# Altium schematic symbol library TitansLib.SchLib: 462 symbols (part 23 of 24)
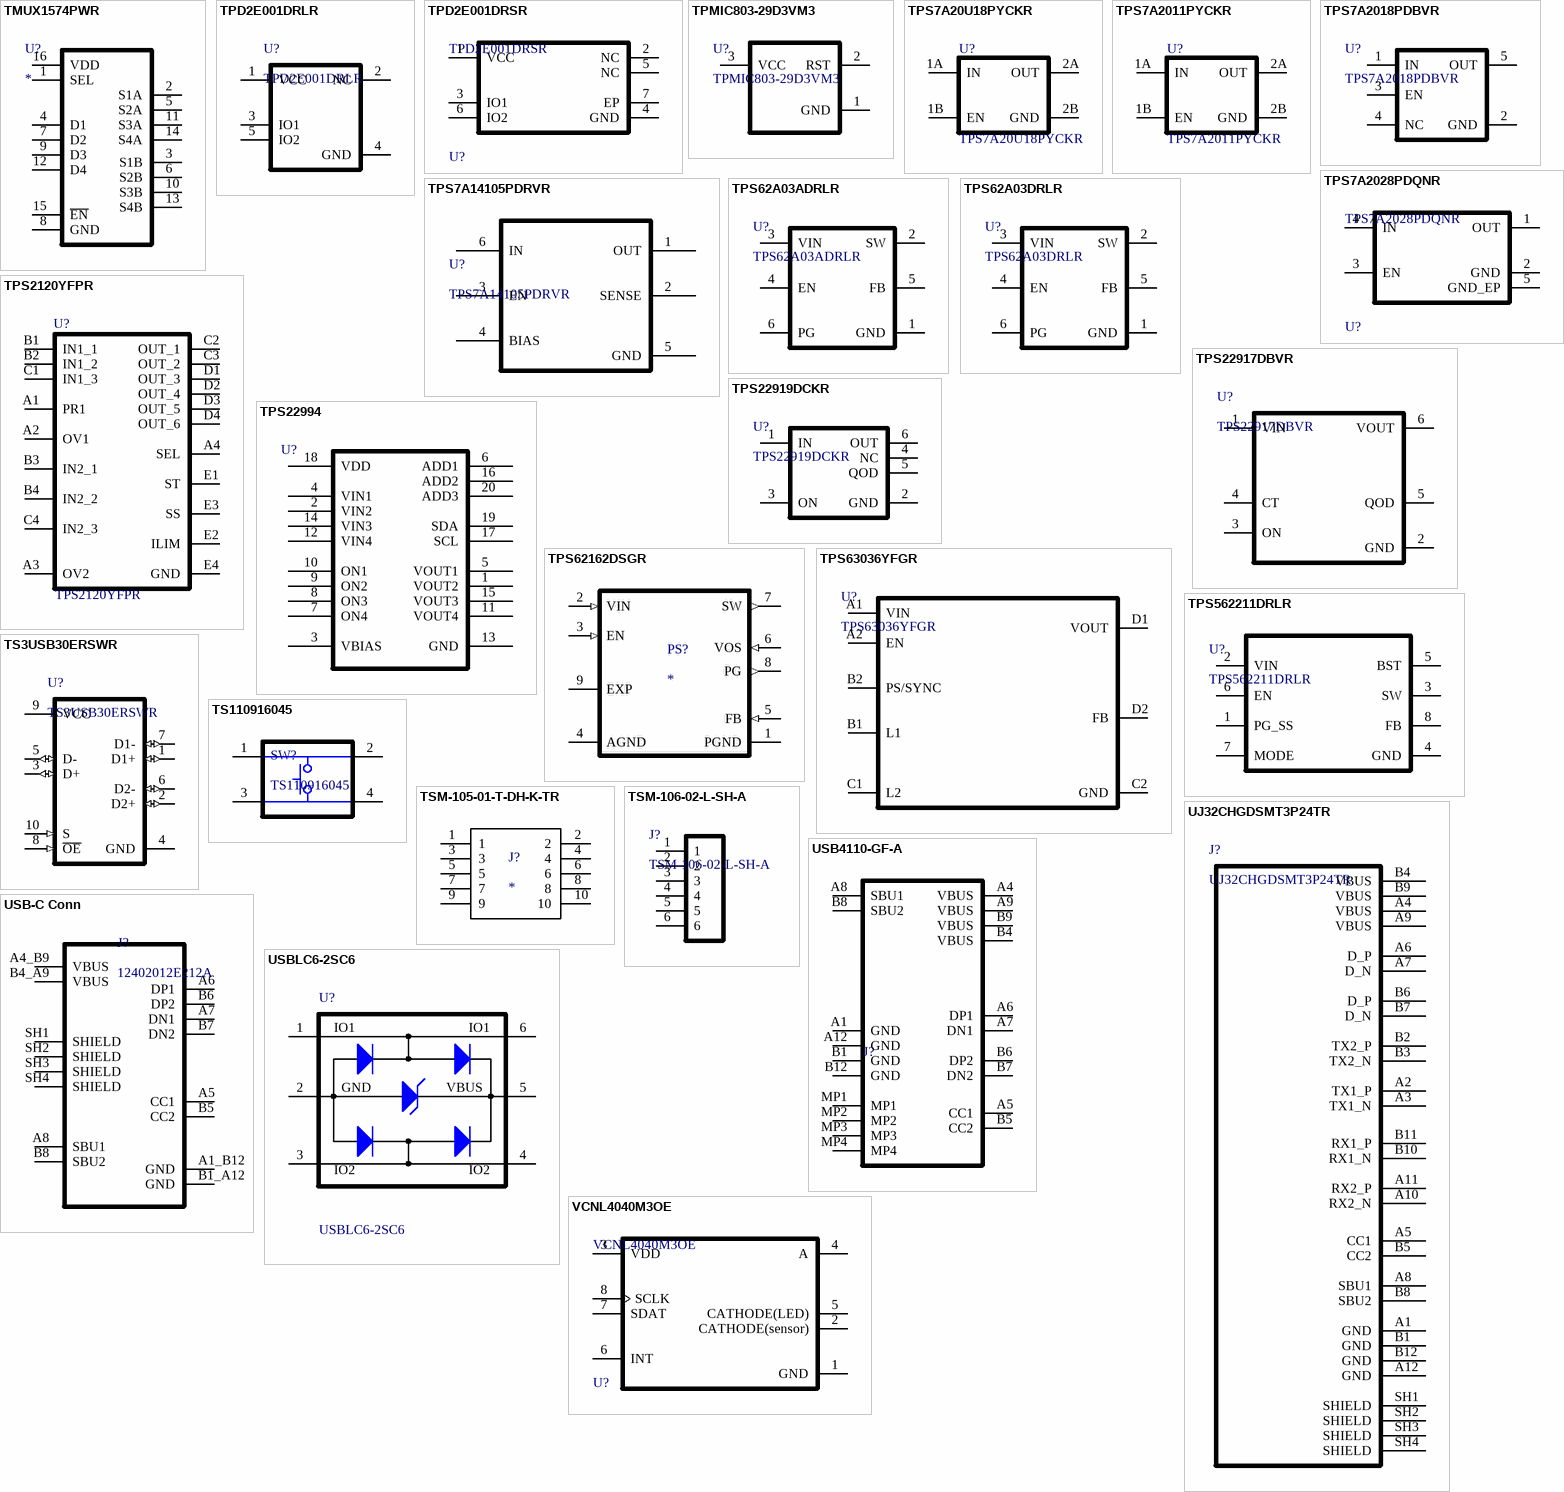
[diagram p39: symbols TMUX1574PWR to VCNL4040M3OE]

## TPD2E001DRSR
designator U?
ESD Suppressor Diode Diode Array Uni-Dir 5.5V 105.5Vc 6-Pin WSON EP T/R; Manufacturer: Texas Instruments; Manufacturer Lifecycle Status: ACTIVE; Breakdown Voltage: 11V; Value: 1.5pF; Clamping Voltage: 25V; Direction: Unidirectional; Element Configuration: Dual; ESD Protection: Yes; Interface: Ethernet, LVDS, USB; Leakage Current: 1nA; Max Junction Temperature (Tj): 150°C; Number of Bidirectional Channels: 2; Test Current: 10mA; Supplier: DigiKey; Supplier Part Number: 296-22850-1-ND; Manufacturer Part Number: TPD2E001DRSR; RoHS: Compliant; Category: ESD and Circuit Protection ICs; Stock: 3433; Pricing: 1=0.75, 10=0.467, 100=0.301, 500=0.229 (USD); Ambient Temperature Range High: 85°C; Contact Plating: Gold; Depth: 3mm; Height: 800µm; Lead Free: Lead Free; Length: 3mm; Lifecycle Status: Production; Max Operating Temperature: 85°C; Max Reverse Leakage Current: 1nA; Min Breakdown Voltage: 11V; Min Operating Temperature: -40°C; Number of Channels: 2; Pins: 6; Operating Supply Voltage: 5.5V; Power Line Protection: Yes; Radiation Hardening: No; REACH SVHC: No; Reverse Standoff Voltage: 5.5V; Schedule B: 8541100080, 8541100080|8541100080|8541100080|8541100080|8541100080; Termination: SMD/SMT; Thickness: 750µm; Width: 3mm; ComponentLink1URL: https://octopart.com:443/opatz8j6/c1?t=G5D4zGozD0BNT3cxhzco7bRIaplnG9lFZaUpRUbE2NnHXxcGA_XCuDnwQhwVF_yok-rTTqT5PFQJ2Qkyk_p6F5OTRnaO5Y9qrqx3r299atTUcFhIGxR9x8XXybA_BTREn7P9YEB8Sxr7wNNf2yrBTcf95Xy-yigiudGeCyD5aZnNwczcJGQhRY90tWEtwvpnsVF99hRq7bMKt9yDuX2oTKLq-so77TKlExe_fHujvGLMwbj1qb29dnxRtQJouMWSDPcMvgy3ROqxbdTBtnrLq__OX75Yskrbqh0KplupRJhJVZ3IAOagwOa-7U_XGct6gKDw8sFVN6jn41bU-fjHhapUVC4JdHJQvOJ4TuDNXVmlPDPTGtQSJ0L2ou7ekI1EwI0TJhY&src-supplier=Texas+Instruments; ComponentLink1Description: https://octopart.com:443/opatz8j6/c1?t=G5D4zGozD0BNT3cxhzco7bRIaplnG9lFZaUpRUbE2NnHXxcGA_XCuDnwQhwVF_yok-rTTqT5PFQJ2Qkyk_p6F5OTRnaO5Y9qrqx3r299atTUcFhIGxR9x8XXybA_BTREn7P9YEB8Sxr7wNNf2yrBTcf95Xy-yigiudGeCyD5aZnNwczcJGQhRY90tWEtwvpnsVF99hRq7bMKt9yDuX2oTKLq-so77TKlExe_fHujvGLMwbj1qb29dnxRtQJouMWSDPcMvgy3ROqxbdTBtnrLq__OX75Yskrbqh0KplupRJhJVZ3IAOagwOa-7U_XGct6gKDw8sFVN6jn41bU-fjHhapUVC4JdHJQvOJ4TuDNXVmlPDPTGtQSJ0L2ou7ekI1EwI0TJhY&src-supplier=Texas+Instruments; ComponentLink2URL: https://datasheet.octopart.com:443/TPD2E001DRSR-Texas-Instruments-datasheet-21096186.pdf?src-supplier=Texas+Instruments; ComponentLink2Description: https://datasheet.octopart.com:443/TPD2E001DRSR-Texas-Instruments-datasheet-21096186.pdf?src-supplier=Texas+Instruments; ComponentLink3URL: https://datasheet.octopart.com:443/TPD2E001DRSR-Texas-Instruments-datasheet-10824604.pdf?src-supplier=Texas+Instruments; ComponentLink3Description: https://datasheet.octopart.com:443/TPD2E001DRSR-Texas-Instruments-datasheet-10824604.pdf?src-supplier=Texas+Instruments; ComponentLink4URL: https://datasheet.octopart.com:443/TPD2E001DRSR-Texas-Instruments-datasheet-10670688.pdf?src-supplier=Texas+Instruments; ComponentLink4Description: https://datasheet.octopart.com:443/TPD2E001DRSR-Texas-Instruments-datasheet-10670688.pdf?src-supplier=Texas+Instruments; ComponentLink5URL: https://sigma.octopart.com:443/49262232/technical_drawing/Texas-Instruments-TPD2E001DRSR.pdf?src-supplier=Texas+Instruments; ComponentLink5Description: https://sigma.octopart.com:443/49262232/technical_drawing/Texas-Instruments-TPD2E001DRSR.pdf?src-supplier=Texas+Instruments; ComponentLink6URL: https://datasheet.octopart.com:443/TPD2E001DRSR-Texas-Instruments-datasheet-153022.pdf?src-supplier=Texas+Instruments; ComponentLink6Description: https://datasheet.octopart.com:443/TPD2E001DRSR-Texas-Instruments-datasheet-153022.pdf?src-supplier=Texas+Instruments; ComponentLink7URL: https://datasheet.octopart.com:443/TPD2E001DRSR-Texas-Instruments-datasheet-151312784.pdf?src-supplier=Upverter; ComponentLink7Description: https://datasheet.octopart.com:443/TPD2E001DRSR-Texas-Instruments-datasheet-151312784.pdf?src-supplier=Upverter; ComponentLink8URL: https://datasheet.octopart.com:443/TPD2E001DRSR-Texas-Instruments-datasheet-32015767.pdf?src-supplier=Farnell; ComponentLink8Description: https://datasheet.octopart.com:443/TPD2E001DRSR-Texas-Instruments-datasheet-32015767.pdf?src-supplier=Farnell; ComponentLink9URL: https://datasheet.octopart.com:443/TPD2E001DRSR-Texas-Instruments-datasheet-10258578.pdf?src-supplier=Farnell; ComponentLink9Description: https://datasheet.octopart.com:443/TPD2E001DRSR-Texas-Instruments-datasheet-10258578.pdf?src-supplier=Farnell; ComponentLink10URL: https://datasheet.octopart.com:443/TPD2E001DRSR-Texas-Instruments-datasheet-12491271.pdf?src-supplier=Farnell; ComponentLink10Description: https://datasheet.octopart.com:443/TPD2E001DRSR-Texas-Instruments-datasheet-12491271.pdf?src-supplier=Farnell; ComponentLink11URL: https://datasheet.octopart.com:443/TPD2E001DRSR-Texas-Instruments-datasheet-10631202.pdf?src-supplier=Farnell; ComponentLink11Description: https://datasheet.octopart.com:443/TPD2E001DRSR-Texas-Instruments-datasheet-10631202.pdf?src-supplier=Farnell; ComponentLink12URL: https://datasheet.octopart.com:443/TPD2E001DRSR-Texas-Instruments-datasheet-5436099.pdf?src-supplier=Farnell; ComponentLink12Description: https://datasheet.octopart.com:443/TPD2E001DRSR-Texas-Instruments-datasheet-5436099.pdf?src-supplier=Farnell; ComponentLink13URL: https://datasheet.octopart.com:443/TPD2E001DRSR-Texas-Instruments-datasheet-37738713.pdf?src-supplier=element14+APAC; ComponentLink13Description: https://datasheet.octopart.com:443/TPD2E001DRSR-Texas-Instruments-datasheet-37738713.pdf?src-supplier=element14+APAC; ComponentLink14URL: https://datasheet.octopart.com:443/TPD2E001DRSR.-Texas-Instruments-datasheet-62333662.pdf?src-supplier=element14+APAC; ComponentLink14Description: https://datasheet.octopart.com:443/TPD2E001DRSR.-Texas-Instruments-datasheet-62333662.pdf?src-supplier=element14+APAC; ComponentLink15URL: https://datasheet.octopart.com:443/TPD2E001DRSR-Texas-Instruments-datasheet-66807720.pdf?src-supplier=Newark; ComponentLink15Description: https://datasheet.octopart.com:443/TPD2E001DRSR-Texas-Instruments-datasheet-66807720.pdf?src-supplier=Newark; ComponentLink16URL: https://datasheet.octopart.com:443/TPD2E001DRSR-Texas-Instruments-datasheet-8470402.pdf?src-supplier=Newark; ComponentLink16Description: https://datasheet.octopart.com:443/TPD2E001DRSR-Texas-Instruments-datasheet-8470402.pdf?src-supplier=Newark; ComponentLink17URL: https://datasheet.octopart.com:443/TPD2E001DRSR-Texas-Instruments-datasheet-164419821.pdf?src-supplier=Augswan; ComponentLink17Description: https://datasheet.octopart.com:443/TPD2E001DRSR-Texas-Instruments-datasheet-164419821.pdf?src-supplier=Augswan; ComponentLink18URL: https://datasheet.octopart.com:443/TPD2E001DRSR-Texas-Instruments-datasheet-159117907.pdf?src-supplier=LCSC; ComponentLink18Description: https://datasheet.octopart.com:443/TPD2E001DRSR-Texas-Instruments-datasheet-159117907.pdf?src-supplier=LCSC; ComponentLink19URL: https://datasheet.octopart.com:443/TPD2E001DRSR-Texas-Instruments-datasheet-14047829.pdf?src-supplier=iiiC; ComponentLink19Description: https://datasheet.octopart.com:443/TPD2E001DRSR-Texas-Instruments-datasheet-14047829.pdf?src-supplier=iiiC; ComponentLink20URL: http://sigma.octopart.com:80/reach_statement/Texas-Instruments-company-64.pdf?src-supplier=Compliance+Statements; ComponentLink20Description: http://sigma.octopart.com:80/reach_statement/Texas-Instruments-company-64.pdf?src-supplier=Compliance+Statements; ComponentLink21URL: http://sigma.octopart.com:80/conflict_mineral_statement/Texas-Instruments-company-63.pdf?src-supplier=Compliance+Statements; ComponentLink21Description: http://sigma.octopart.com:80/conflict_mineral_statement/Texas-Instruments-company-63.pdf?src-supplier=Compliance+Statements; Supplier 1: DigiKey; Supplier Part Number 1: 296-22850-1-ND; Supplier 2: DigiKey; Supplier Part Number 2: 296-22850-2-ND; Supplier 3: Mouser; Supplier Part Number 3: 595-TPD2E001DRSR
footprint TPD2E001DRSR
pins: 1 VCC (power), 2 NC, 3 IO1, 4 GND (power), 5 NC, 6 IO2, 7 EP (power)

## TPMIC803-29D3VM3
designator U?
Active Low 1V~5.5V 1 SOT-23 Supervisors RoHS; Manufacturer Name: TECH PUBLIC; Supplier Name: LCSC; Manufacturer Part Number: TPMIC803-29D3VM3; Supplier Unit Price: 0.0828; Supplier Part Number: C52817261
footprint SOT23-3 (SOT23, 3-Leads, Body 2,93x2,66mm, Pitch 0,95mm, IPC Low Density)
pins: 1 GND, 2 RST, 3 VCC

## TPS7A20U18PYCKR
designator U?
footprint TPS7A20U18PYCKR
pins: 1A IN, 1B EN, 2A OUT, 2B GND

## TPS7A2011PYCKR
designator U?
300-mA ultra-low-noise low-IQ low-dropout (LDO) linear regulator with high PSRR 4-DSBGA -40 to 125; Manufacturer: Texas Instruments; Supplier: Digikey; Supplier Part Number: 296-TPS7A2011PYCKRCT-ND; Manufacturer Part Number: TPS7A2011PYCKR; RoHS: No; Stock: 10116; Pricing: 1=0.36, 10=0.25, 25=0.2228, 100=0.1923, 250=0.17768, 500=0.16892, 1000=0.1617, 2500=0.15407, 5000=0.14947 (USD)
footprint TPS7A2011PYCKR
pins: 1A IN, 1B EN, 2A OUT, 2B GND

## TPS7A2018PDBVR
designator U?
Fixed Positive LDO Regulator, 1.8V, 0.24V Dropout, PDSO5; Manufacturer: Texas Instruments; Supplier: Mouser; Supplier Part Number: 595-TPS7A2018PDBVR; Manufacturer Part Number: TPS7A2018PDBVR; RoHS: Yes; Category: Voltage Regulators - Linear; Stock: 21069; Pricing: 1=0.29, 10=0.2, 50=0.178, 100=0.153, 1000=0.128, 10000=0.112 (USD); Supplier 1: Digikey; Supplier Part Number 1: 296-TPS7A2018PDBVRCT-ND; Supplier 2: Mouser; Supplier Part Number 2: 595-TPS7A2018PDBVR
footprint SOT95P280X145-5N (SOT23, 5-Leads, Body 2.90x2.80mm, Pitch 0.95mm, IPC Medium Density)
pins: 1 IN, 2 GND, 3 EN, 4 NC, 5 OUT

## TPS7A2028PDQNR
designator U?
300-mA, ultra-low-noise, low-IQ, low-dropout (LDO) linear regulator with high PSRR; Manufacturer: Texas Instruments; Manufacturer Lifecycle Status: ACTIVE; Accuracy: 1.5%; Dropout Voltage: 690mV; Max Junction Temperature (Tj): 125°C; Max Supply Voltage: 6V; Min Supply Voltage: 1.6V; Nominal Supply Current: 6.5µA; Number of Outputs: 1; Output Current: 300mA; Output Voltage: 2.8V; RoHS Compliant: Yes; Supplier: DigiKey; Supplier Part Number: 296-TPS7A2028PDQNRCT-ND; Manufacturer Part Number: TPS7A2028PDQNR; RoHS: Compliant; Category: LDO Voltage Regulators; Stock: 6054; Pricing: 1=0.32, 10=0.218, 25=0.1936, 100=0.1665, 250=0.15364, 500=0.1459, 1000=0.13951 (USD); Height: 400µm; Length: 1mm; Lifecycle Status: Production; Max Operating Temperature: 125°C; Min Operating Temperature: -40°C; Pins: 4; Schedule B: 8542390000|8542390000|8542390000|8542390000|8542390000|8542390000|8542390000|8542390000|8542390000|8542390000|8542390000|8542390000|8542390000|8542390000|8542390000|8542390000|8542390000|8542390000|8542390000|8542390000|8542390000|8542390000|8542390000|85; Thickness: 370µm; Width: 1mm; ComponentLink1URL: https://octopart.com:443/opatz8j6/c1?t=SF9bC7tFynFx4Xro6lmQcKm4TEQD8kBXuObdZLms85MXt7QgTq48hb4Bm0Z9h4nRSW3pICdtZqtwevxII1MLQv9X_OzwOwQUowpUkqWUJdmxiMQmweMNTsAErNR7WGCMeu97h-jVe_HXPNxQdf5RRp_qgaqVpLEOsIwJ8AAW93UMYYyOkwWlzLmR5TvfdFdv0oQ7hG_HqgBwCoHyB-uorefbEpqEZCM0cY-tD1h7tFsKtJAIzhyXLpVPEARY6VvGx_O7pW854wjPHpwZm5Tl2c9CsnGavESS5DScbrof0D7yYR0qDmtZeaSJsjLX-O-ktLqb8-68AbEmTer7ungo6nsfa4abE11pszgYw0yKP-altsHwxzkg3EUwqDw1vIUSxZD__nU&src-supplier=Texas+Instruments; ComponentLink1Description: https://octopart.com:443/opatz8j6/c1?t=SF9bC7tFynFx4Xro6lmQcKm4TEQD8kBXuObdZLms85MXt7QgTq48hb4Bm0Z9h4nRSW3pICdtZqtwevxII1MLQv9X_OzwOwQUowpUkqWUJdmxiMQmweMNTsAErNR7WGCMeu97h-jVe_HXPNxQdf5RRp_qgaqVpLEOsIwJ8AAW93UMYYyOkwWlzLmR5TvfdFdv0oQ7hG_HqgBwCoHyB-uorefbEpqEZCM0cY-tD1h7tFsKtJAIzhyXLpVPEARY6VvGx_O7pW854wjPHpwZm5Tl2c9CsnGavESS5DScbrof0D7yYR0qDmtZeaSJsjLX-O-ktLqb8-68AbEmTer7ungo6nsfa4abE11pszgYw0yKP-altsHwxzkg3EUwqDw1vIUSxZD__nU&src-supplier=Texas+Instruments; ComponentLink2URL: https://sigma.octopart.com:443/68308705/technical_drawing/Texas-Instruments-TPS7A2028PDQNR.pdf?src-supplier=Texas+Instruments; ComponentLink2Description: https://sigma.octopart.com:443/68308705/technical_drawing/Texas-Instruments-TPS7A2028PDQNR.pdf?src-supplier=Texas+Instruments; ComponentLink3URL: https://datasheet.octopart.com:443/TPS7A2028PDQNR-Texas-Instruments-datasheet-153902339.pdf?src-supplier=Upverter; ComponentLink3Description: https://datasheet.octopart.com:443/TPS7A2028PDQNR-Texas-Instruments-datasheet-153902339.pdf?src-supplier=Upverter; ComponentLink4URL: https://datasheet.octopart.com:443/TPS7A2028PDQNR-Texas-Instruments-datasheet-164420832.pdf?src-supplier=Augswan; ComponentLink4Description: https://datasheet.octopart.com:443/TPS7A2028PDQNR-Texas-Instruments-datasheet-164420832.pdf?src-supplier=Augswan; ComponentLink5URL: http://sigma.octopart.com:80/reach_statement/Texas-Instruments-company-64.pdf?src-supplier=Compliance+Statements; ComponentLink5Description: http://sigma.octopart.com:80/reach_statement/Texas-Instruments-company-64.pdf?src-supplier=Compliance+Statements; ComponentLink6URL: http://sigma.octopart.com:80/conflict_mineral_statement/Texas-Instruments-company-63.pdf?src-supplier=Compliance+Statements; ComponentLink6Description: http://sigma.octopart.com:80/conflict_mineral_statement/Texas-Instruments-company-63.pdf?src-supplier=Compliance+Statements; Supplier 1: DigiKey; Supplier Part Number 1: 296-TPS7A2028PDQNRCT-ND; Supplier 2: DigiKey; Supplier Part Number 2: 296-TPS7A2028PDQNRTR-ND; Supplier 3: Mouser; Supplier Part Number 3: 595-TPS7A2028PDQNR
footprint 4-X2SON
pins: 1 OUT, 2 GND (power), 3 EN, 4 IN (power), 5 GND_EP (power)

## TPS7A14105PDRVR
designator U?
Supplier 1: DigiKey; Supplier Part Number 1: 296-TPS7A14105PDRVRCT-ND; Supplier 2: Mouser; Supplier Part Number 2: 595-TPS7A14105PDRVR
footprint TPS7A14105PDRVR (PSON, 6-Leads, Body 2,00x2,00mm, Pitch 0,65mm, Thermal Pad 1,65x1,05mm, IPC High Density)
pins: 1 OUT, 2 SENSE, 3 EN, 4 BIAS, 5 GND, 6 IN

## TPS62A03ADRLR
designator U?
2.5V to 5.5V input, 3A high-efficiency synchronous buck converter with forced PWM in SOT-563 package 6-SOT-5X3 -40 to...; Manufacturer: Texas Instruments; Supplier: Mouser; Supplier Part Number: 595-TPS62A03ADRLR; Manufacturer Part Number: TPS62A03ADRLR; RoHS: No; Stock: 3474; Pricing: 1=0.6, 10=0.355, 50=0.299, 100=0.227, 1000=0.147, 10000=0.102 (USD); Supplier 1: Digikey; Supplier Part Number 1: 296-TPS62A03ADRLRCT-ND; Supplier 2: Mouser; Supplier Part Number 2: 595-TPS62A03ADRLR
footprint SOT50P160X60-6N (SOT23, 6-Leads, Body 1.60x1.60mm, Pitch 0.50mm, IPC Medium Density)
pins: 1 GND, 2 SW, 3 VIN, 4 EN, 5 FB, 6 PG

## TPS62A03DRLR
designator U?
2.5V to 5.5V input, 3A high-efficiency synchronous buck converter in SOT-563 package 6-SOT-5X3 -40 to 125; Manufacturer: Texas Instruments; Manufacturer Lifecycle Status: ACTIVE; Supplier: DigiKey; Supplier Part Number: 296-TPS62A03DRLRCT-ND; Manufacturer Part Number: TPS62A03DRLR; RoHS: Compliant; Category: Voltage Regulators - Switching; Stock: 4949; Pricing: 1=0.29, 10=0.198, 25=0.1756, 100=0.151, 250=0.13912, 500=0.132, 1000=0.12613 (USD); Height: 600µm; Length: 1.6mm; Lifecycle Status: Production; Pins: 6; Thickness: 550µm; Topology: Buck; Width: 1.2mm; ComponentLink1URL: https://sigma.octopart.com:443/181443429/technical_drawing/Texas-Instruments-TPS62A03DRLR.pdf?src-supplier=Texas+Instruments; ComponentLink1Description: https://sigma.octopart.com:443/181443429/technical_drawing/Texas-Instruments-TPS62A03DRLR.pdf?src-supplier=Texas+Instruments; ComponentLink2URL: https://octopart.com:443/opatz8j6/c1?t=wXtfc8wBM2_hrpXcXEAyh0pGDW2b2ycAfux5IJZ8xUDOCKksxXuFR2DErS5VIykD_sQE9EcWwxXohYuc_CPg9xKydIJpSbsLwmVUop9Iu0GMK7o3FIPEivN42D5AlOFlbjWuNvF0XIiNw3gjXWo3P7utocb4Nj0DGhZ4HCjBeFIpM2zwOuQjMvKI7LfQBPAbcyu_e14rSO1ku4LKC7BC-KamE9_gcf6BQfdt_pWm7nWOI2RWwNjCFA7AlogNvILamPvdqdRnxLTwTwhadwYzqXnX7gE5HHAkp0NHAGUnpHSDkBA5T4HR9I99AUFvVUnie4t8pW0A2QbJk7LcyHQ8PdWSuUSip_iEoeh16DBx_aCvTvtX13xpyTbnxXsjKJiMcLX7yctb2w&src-supplier=Texas+Instruments; ComponentLink2Description: https://octopart.com:443/opatz8j6/c1?t=wXtfc8wBM2_hrpXcXEAyh0pGDW2b2ycAfux5IJZ8xUDOCKksxXuFR2DErS5VIykD_sQE9EcWwxXohYuc_CPg9xKydIJpSbsLwmVUop9Iu0GMK7o3FIPEivN42D5AlOFlbjWuNvF0XIiNw3gjXWo3P7utocb4Nj0DGhZ4HCjBeFIpM2zwOuQjMvKI7LfQBPAbcyu_e14rSO1ku4LKC7BC-KamE9_gcf6BQfdt_pWm7nWOI2RWwNjCFA7AlogNvILamPvdqdRnxLTwTwhadwYzqXnX7gE5HHAkp0NHAGUnpHSDkBA5T4HR9I99AUFvVUnie4t8pW0A2QbJk7LcyHQ8PdWSuUSip_iEoeh16DBx_aCvTvtX13xpyTbnxXsjKJiMcLX7yctb2w&src-supplier=Texas+Instruments; ComponentLink3URL: https://datasheet.octopart.com:443/TPS62A03DRLR-Texas-Instruments-datasheet-184290309.pdf?src-supplier=LCSC; ComponentLink3Description: https://datasheet.octopart.com:443/TPS62A03DRLR-Texas-Instruments-datasheet-184290309.pdf?src-supplier=LCSC; ComponentLink4URL: http://sigma.octopart.com:80/reach_statement/Texas-Instruments-company-64.pdf?src-supplier=Compliance+Statements; ComponentLink4Description: http://sigma.octopart.com:80/reach_statement/Texas-Instruments-company-64.pdf?src-supplier=Compliance+Statements; ComponentLink5URL: http://sigma.octopart.com:80/conflict_mineral_statement/Texas-Instruments-company-63.pdf?src-supplier=Compliance+Statements; ComponentLink5Description: http://sigma.octopart.com:80/conflict_mineral_statement/Texas-Instruments-company-63.pdf?src-supplier=Compliance+Statements; Supplier 1: DigiKey; Supplier Part Number 1: 296-TPS62A03DRLRCT-ND; Supplier 2: DigiKey; Supplier Part Number 2: 296-TPS62A03DRLRTR-ND; Supplier 3: Mouser; Supplier Part Number 3: 595-TPS62A03DRLR
footprint SOT50P160X60-6N (SOT23, 6-Leads, Body 1.60x1.60mm, Pitch 0.50mm, IPC Medium Density)
pins: 1 GND, 2 SW, 3 VIN, 4 EN, 5 FB, 6 PG

## TPS2120YFPR
designator U?
2.7-22V, 62m, 3A, Priority Power MUX with Seamless Switchover; Manufacturer_Name: Texas Instruments; Geometry.Height: 0.5mm; Mouser Part Number: 595-TPS2120YFPR; Mouser Price/Stock: https://www.mouser.co.uk/ProductDetail/Texas-Instruments/TPS2120YFPR?qs=qSfuJ%252Bfl%2Fd6pUAHOUCGEAg%3D%3D; Manufacturer_Part_Number: TPS2120YFPR; Datasheet Link: http://www.ti.com/lit/gpn/TPS2120
footprint BGA20C40P4X5_156X196X50
pins: A1 PR1, A2 OV1, A3 OV2, A4 SEL, B1 IN1_1, B2 IN1_2, B3 IN2_1, B4 IN2_2, C1 IN1_3, C2 OUT_1, C3 OUT_2, C4 IN2_3, D1 OUT_3, D2 OUT_4, D3 OUT_5, D4 OUT_6, E1 ST, E2 ILIM, E3 SS, E4 GND

## TPS22917DBVR
designator U?
IC PWR SWITCH P-CHAN 1: 1 SOT23-6 / 1 V–5.5-V, 2-A, 80-m(ohm) Ultra-Low Leakage Load Switch; Manufacturer: Texas Instruments; Manufacturer Lifecycle Status: ACTIVE; Fall Time: 22µs; Max Junction Temperature (Tj): 125°C; Max Supply Voltage: 5.5V; Min Supply Voltage: 1V; Nominal Supply Current: 500nA; Number of Channels: 1; Output Current: 2A; Rise Time: 55µs; Turn-Off Delay Time: 10µs; Turn-On Delay Time: 100µs; Supplier: DigiKey; Supplier Part Number: 296-50498-1-ND; Manufacturer Part Number: TPS22917DBVR; RoHS: Compliant; Category: Power Switch ICs - Power Distribution; Stock: 113274; Pricing: 1=0,46, 10=0,323, 25=0,288, 100=0,2498, 250=0,23164, 500=0,22064, 1000=0,21161 (USD); Case/Package: SOT-23; Height: 0m; Length: 2.9mm; Lifecycle Status: Production; Max Operating Temperature: 125°C; Min Operating Temperature: -40°C; Number of Drivers: 1; Number of Outputs: 1; Pins: 6; Output Voltage: 5.5V; Schedule B: 8542390000, 8542390000|8542390000|8542390000|8542390000|8542390000|8542390000|8542390000|8542390000|8542390000|8542390000|8542390000|8542390000|8542390000|8542390000|8542390000|8542390000|8542390000|8542390000|8542390000|8542390000|8542390000|8542390000|8542390000|85; Thickness: 1.2mm; Width: 1.6mm; ComponentLink1URL: https://sigma.octopart.com:443/182282880/technical_drawing/Texas-Instruments-TPS22917DBVR.pdf?src-supplier=Texas+Instruments; ComponentLink1Description: https://sigma.octopart.com:443/182282880/technical_drawing/Texas-Instruments-TPS22917DBVR.pdf?src-supplier=Texas+Instruments; ComponentLink2URL: https://octopart.com:443/opatz8j6/c1?t=s7oqWYWqd8Acm2PCVdh0pCL5jB9mlFOYp9aroHxk02FioZL5T9-e7d8rcUIsmlTk17nFevmp2_h_BqBrvSo16kkNoBB9K_1kf8Mx09aedtKkm1Iqdl1kgfmUglTYOiFJ64TDyhqq_KXqGxmnZyw-q-kZ8eZIiVhqLfOf84y_QaelPhMgx7jCwhdTu8HqZSv9_WOnGif2fXbrIUybfXxX7Q_KXb5E23slRP_fB-OLiDYj7dQSnZHm8mszhNsD3lVP1s2PUILEVXSwsATeaHgzu_I4H6qc3xQ2p8h08DcyzyNyhkyr36YWr3qArFG7S5RjqzzfIYOGd-clkSixobTQ7i_sodeTFUn5nZuudgcBjEs-ZRUyKsI3GBQzVpz2hnYR2-6aLRqR&src-supplier=Texas+Instruments; ComponentLink2Description: https://octopart.com:443/opatz8j6/c1?t=s7oqWYWqd8Acm2PCVdh0pCL5jB9mlFOYp9aroHxk02FioZL5T9-e7d8rcUIsmlTk17nFevmp2_h_BqBrvSo16kkNoBB9K_1kf8Mx09aedtKkm1Iqdl1kgfmUglTYOiFJ64TDyhqq_KXqGxmnZyw-q-kZ8eZIiVhqLfOf84y_QaelPhMgx7jCwhdTu8HqZSv9_WOnGif2fXbrIUybfXxX7Q_KXb5E23slRP_fB-OLiDYj7dQSnZHm8mszhNsD3lVP1s2PUILEVXSwsATeaHgzu_I4H6qc3xQ2p8h08DcyzyNyhkyr36YWr3qArFG7S5RjqzzfIYOGd-clkSixobTQ7i_sodeTFUn5nZuudgcBjEs-ZRUyKsI3GBQzVpz2hnYR2-6aLRqR&src-supplier=Texas+Instruments; ComponentLink3URL: https://sigma.octopart.com:443/179253514/technical_drawing/Texas-Instruments-TPS22917DBVR.pdf?src-supplier=Texas+Instruments; ComponentLink3Description: https://sigma.octopart.com:443/179253514/technical_drawing/Texas-Instruments-TPS22917DBVR.pdf?src-supplier=Texas+Instruments; ComponentLink4URL: https://sigma.octopart.com:443/177332312/technical_drawing/Texas-Instruments-TPS22917DBVR.pdf?src-supplier=Texas+Instruments; ComponentLink4Description: https://sigma.octopart.com:443/177332312/technical_drawing/Texas-Instruments-TPS22917DBVR.pdf?src-supplier=Texas+Instruments; ComponentLink5URL: https://sigma.octopart.com:443/175570407/technical_drawing/Texas-Instruments-TPS22917DBVR.pdf?src-supplier=Texas+Instruments; ComponentLink5Description: https://sigma.octopart.com:443/175570407/technical_drawing/Texas-Instruments-TPS22917DBVR.pdf?src-supplier=Texas+Instruments; ComponentLink6URL: https://sigma.octopart.com:443/154719501/technical_drawing/Texas-Instruments-TPS22917DBVR.pdf?src-supplier=Texas+Instruments; ComponentLink6Description: https://sigma.octopart.com:443/154719501/technical_drawing/Texas-Instruments-TPS22917DBVR.pdf?src-supplier=Texas+Instruments; ComponentLink7URL: https://sigma.octopart.com:443/49249327/technical_drawing/Texas-Instruments-TPS22917DBVR.pdf?src-supplier=Texas+Instruments; ComponentLink7Description: https://sigma.octopart.com:443/49249327/technical_drawing/Texas-Instruments-TPS22917DBVR.pdf?src-supplier=Texas+Instruments; ComponentLink8URL: https://datasheet.octopart.com:443/TPS22917DBVR-Texas-Instruments-datasheet-184973194.pdf?src-supplier=Future+Electronics; ComponentLink8Description: https://datasheet.octopart.com:443/TPS22917DBVR-Texas-Instruments-datasheet-184973194.pdf?src-supplier=Future+Electronics; ComponentLink9URL: https://datasheet.octopart.com:443/TPS22917DBVR-Texas-Instruments-datasheet-159117948.pdf?src-supplier=LCSC; ComponentLink9Description: https://datasheet.octopart.com:443/TPS22917DBVR-Texas-Instruments-datasheet-159117948.pdf?src-supplier=LCSC; ComponentLink10URL: https://datasheet.octopart.com:443/TPS22917DBVR-Texas-Instruments-datasheet-164420083.pdf?src-supplier=SHENGYU+ELECTRONICS; ComponentLink10Description: https://datasheet.octopart.com:443/TPS22917DBVR-Texas-Instruments-datasheet-164420083.pdf?src-supplier=SHENGYU+ELECTRONICS; ComponentLink11URL: http://sigma.octopart.com:80/reach_statement/Texas-Instruments-company-64.pdf?src-supplier=Compliance+Statements; ComponentLink11Description: http://sigma.octopart.com:80/reach_statement/Texas-Instruments-company-64.pdf?src-supplier=Compliance+Statements; ComponentLink12URL: http://sigma.octopart.com:80/conflict_mineral_statement/Texas-Instruments-company-63.pdf?src-supplier=Compliance+Statements; ComponentLink12Description: http://sigma.octopart.com:80/conflict_mineral_statement/Texas-Instruments-company-63.pdf?src-supplier=Compliance+Statements; Supplier 1: DigiKey; Supplier Part Number 1: 296-50498-1-ND; Supplier 2: DigiKey; Supplier Part Number 2: 296-50498-6-ND; Supplier 3: Mouser; Supplier Part Number 3: 595-TPS22917DBVR
footprint TPS22917DBVR (SOT23, 6-Leads, Body 2,90x2,80mm, Pitch 0,95mm, IPC Medium Density)
pins: 1 VIN, 2 GND, 3 ON, 4 CT, 5 QOD, 6 VOUT

## TPS22919DCKR
designator U?
5.5-V, 1.5-A, 90-mΩ load switch with adj. output discharge 6-SC70 -40 to 105; Manufacturer: Texas Instruments; Manufacturer Lifecycle Status: ACTIVE; Fall Time: 10µs; Max Supply Voltage: 5.5V; Min Supply Voltage: 1.6V; Nominal Supply Current: 8µA; Number of Channels: 1; Output Current: 1.5A; Rise Time: 750µs; Turn-Off Delay Time: 6µs; Turn-On Delay Time: 1.5ms; Supplier: DigiKey; Supplier Part Number: 296-TPS22919DCKRDKR-ND; Manufacturer Part Number: TPS22919DCKR; RoHS: Compliant; Category: Power Switch ICs - Power Distribution; Stock: 64981; Pricing: 1=0,2, 10=0,137, 25=0,1208, 100=0,103, 250=0,09448, 500=0,08934, 1000=0,08509 (USD); Ambient Temperature Range High: 105°C; Height: 1.1mm; Length: 2mm; Lifecycle Status: Production; Max Operating Temperature: 105°C; Min Operating Temperature: -40°C; Number of Drivers: 1; Number of Outputs: 1; Pins: 6; Schedule B: 8542390000, 8542390000|8542390000|8542390000|8542390000|8542390000; Thickness: 900µm; Width: 1.25mm; ComponentLink1URL: https://sigma.octopart.com:443/182282881/technical_drawing/Texas-Instruments-TPS22919DCKR.pdf?src-supplier=Texas+Instruments; ComponentLink1Description: https://sigma.octopart.com:443/182282881/technical_drawing/Texas-Instruments-TPS22919DCKR.pdf?src-supplier=Texas+Instruments; ComponentLink2URL: https://octopart.com:443/opatz8j6/c1?t=nuaJa4mDf6AlqMCZI5DBpMOfJpKvPeRMKVvYa6LdWtf9mlVAHOn5BOqmCpqPZwR0h1_1zoxNv94nQ8mR0g27RpUrLChLhD3wngmWVJrOlFEJ80eeFws2TItTjGHeLi96MKolrm8Q4N1MdRkn9KplGSUEr1vOxudl98zkK5s9CBsj0MJk8q6yd5f9pAmaKpCjWKYt2kPyGT40sH8yClbjfA9h7YMJlKeyekfnF8cfk-TH8TBe_6StXcRDHnTlPvjNY9zkQRFWSpSv-6XYBAc3kMIW4cjYUcYwiLEyD0B0KuaSD29LXf3MaWnvu7yY0k7sU7qvxZSSu5elOTEVqOlcN8ZzaSy5Q64vADKAS22i4Cyi0TS4H1DanEj6_eFxNNALFjqMLm0&src-supplier=Texas+Instruments; ComponentLink2Description: https://octopart.com:443/opatz8j6/c1?t=nuaJa4mDf6AlqMCZI5DBpMOfJpKvPeRMKVvYa6LdWtf9mlVAHOn5BOqmCpqPZwR0h1_1zoxNv94nQ8mR0g27RpUrLChLhD3wngmWVJrOlFEJ80eeFws2TItTjGHeLi96MKolrm8Q4N1MdRkn9KplGSUEr1vOxudl98zkK5s9CBsj0MJk8q6yd5f9pAmaKpCjWKYt2kPyGT40sH8yClbjfA9h7YMJlKeyekfnF8cfk-TH8TBe_6StXcRDHnTlPvjNY9zkQRFWSpSv-6XYBAc3kMIW4cjYUcYwiLEyD0B0KuaSD29LXf3MaWnvu7yY0k7sU7qvxZSSu5elOTEVqOlcN8ZzaSy5Q64vADKAS22i4Cyi0TS4H1DanEj6_eFxNNALFjqMLm0&src-supplier=Texas+Instruments; ComponentLink3URL: https://sigma.octopart.com:443/178868976/technical_drawing/Texas-Instruments-TPS22919DCKR.pdf?src-supplier=Texas+Instruments; ComponentLink3Description: https://sigma.octopart.com:443/178868976/technical_drawing/Texas-Instruments-TPS22919DCKR.pdf?src-supplier=Texas+Instruments; ComponentLink4URL: https://sigma.octopart.com:443/49249328/technical_drawing/Texas-Instruments-TPS22919DCKR.pdf?src-supplier=Texas+Instruments; ComponentLink4Description: https://sigma.octopart.com:443/49249328/technical_drawing/Texas-Instruments-TPS22919DCKR.pdf?src-supplier=Texas+Instruments; ComponentLink5URL: https://datasheet.octopart.com:443/TPS22919DCKR-Texas-Instruments-datasheet-164420087.pdf?src-supplier=SHENGYU+ELECTRONICS; ComponentLink5Description: https://datasheet.octopart.com:443/TPS22919DCKR-Texas-Instruments-datasheet-164420087.pdf?src-supplier=SHENGYU+ELECTRONICS; ComponentLink6URL: http://sigma.octopart.com:80/reach_statement/Texas-Instruments-company-64.pdf?src-supplier=Compliance+Statements; ComponentLink6Description: http://sigma.octopart.com:80/reach_statement/Texas-Instruments-company-64.pdf?src-supplier=Compliance+Statements; ComponentLink7URL: http://sigma.octopart.com:80/conflict_mineral_statement/Texas-Instruments-company-63.pdf?src-supplier=Compliance+Statements; ComponentLink7Description: http://sigma.octopart.com:80/conflict_mineral_statement/Texas-Instruments-company-63.pdf?src-supplier=Compliance+Statements; Supplier 1: DigiKey; Supplier Part Number 1: 296-TPS22919DCKRDKR-ND; Supplier 2: DigiKey; Supplier Part Number 2: 296-TPS22919DCKRCT-ND; Supplier 3: LCSC; Supplier Part Number 3: C2149796
footprint SOT65P210X110-6N (SOT23, 6-Leads, Body 2.00x2.10mm, Pitch 0.65mm, IPC Medium Density)
pins: 1 IN, 2 GND, 3 ON, 4 NC, 5 QOD, 6 OUT

## TPS22994
designator U?
4-ch, 3.6-V, 1-A, 41-mΩ load switch with I2C control 20-WQFN -40 to 85; Manufacturer: Texas Instruments; Manufacturer Part Number: TPS22994RUKR; Manufacturer Lifecycle Status: ACTIVE; Max Output current: 1A; Number of Channels: 4; Output Configuration: High Side; Supplier: DigiKey; Supplier Part Number: 296-40724-1-ND; RoHS: Compliant; Category: Power Switch ICs - Power Distribution; Stock: 2020; Pricing: 1=1,4, 10=1,018, 25=0,9224, 100=0,8174, 250=0,76732, 500=0,73714, 1000=0,72675 (USD); Height: 0m; Interface: I2C; Lead Free: Lead Free; Length: 3mm; Lifecycle Status: Production; Max Operating Temperature: 85°C; Min Operating Temperature: -40°C; Mounting Technology: Surface Mount; Number of Outputs: 4; Pins: 20; Output Current: 1A; Packaging: Tape & Reel (TR); Radiation Hardening: No; Thickness: 750µm; Width: 3mm; ComponentLink1URL: https://sigma.octopart.com:443/175810709/technical_drawing/Texas-Instruments-TPS22994RUKR.pdf?src-supplier=Texas+Instruments; ComponentLink1Description: https://sigma.octopart.com:443/175810709/technical_drawing/Texas-Instruments-TPS22994RUKR.pdf?src-supplier=Texas+Instruments; ComponentLink2URL: https://octopart.com:443/opatz8j6/c1?t=2agi9YJHLF9eVwquATTEJx8a7aD5nBKGKM0XyufoGxEecYtSltUr3s6pBcnJh4yKEzkS4ISXUc_0lp5XBQSdmD4ALb0gBamhL688ys4UO8dVrsCKoUz7-6_mx4bmfcWClZ-SIRplTdFbEKV5--aQKVZ883FMGlXs7bwRs_hTr6WtuCo5zN98nbMFE5UCc8NX9B7T3tuV9PIsG0dTQW1rF_xqXJh9qBPPbv1AXikpPARRQWoPtzDFZnnkLJbU6YvDoXByLXVMc3aN6DCxkzNlat5n_8L9CvWguNeg6r7QP96ZyvVd0uYPMNdpAFS2nX19kZyC1jkO6CS7GXFGTAZDZYqHhctm1o2Yw66Y4M8fiikVodGw2t6WX7VZjNshVNM9XpZzCis&src-supplier=Texas+Instruments; ComponentLink2Description: https://octopart.com:443/opatz8j6/c1?t=2agi9YJHLF9eVwquATTEJx8a7aD5nBKGKM0XyufoGxEecYtSltUr3s6pBcnJh4yKEzkS4ISXUc_0lp5XBQSdmD4ALb0gBamhL688ys4UO8dVrsCKoUz7-6_mx4bmfcWClZ-SIRplTdFbEKV5--aQKVZ883FMGlXs7bwRs_hTr6WtuCo5zN98nbMFE5UCc8NX9B7T3tuV9PIsG0dTQW1rF_xqXJh9qBPPbv1AXikpPARRQWoPtzDFZnnkLJbU6YvDoXByLXVMc3aN6DCxkzNlat5n_8L9CvWguNeg6r7QP96ZyvVd0uYPMNdpAFS2nX19kZyC1jkO6CS7GXFGTAZDZYqHhctm1o2Yw66Y4M8fiikVodGw2t6WX7VZjNshVNM9XpZzCis&src-supplier=Texas+Instruments; ComponentLink3URL: https://sigma.octopart.com:443/157851285/technical_drawing/Texas-Instruments-TPS22994RUKR.pdf?src-supplier=Texas+Instruments; ComponentLink3Description: https://sigma.octopart.com:443/157851285/technical_drawing/Texas-Instruments-TPS22994RUKR.pdf?src-supplier=Texas+Instruments; ComponentLink4URL: https://datasheet.octopart.com:443/TPS22994RUKR-Texas-Instruments-datasheet-32037707.pdf?src-supplier=Texas+Instruments; ComponentLink4Description: https://datasheet.octopart.com:443/TPS22994RUKR-Texas-Instruments-datasheet-32037707.pdf?src-supplier=Texas+Instruments; ComponentLink5URL: https://sigma.octopart.com:443/49252653/technical_drawing/Texas-Instruments-TPS22994RUKR.pdf?src-supplier=Texas+Instruments; ComponentLink5Description: https://sigma.octopart.com:443/49252653/technical_drawing/Texas-Instruments-TPS22994RUKR.pdf?src-supplier=Texas+Instruments; ComponentLink6URL: https://datasheet.octopart.com:443/TPS22994RUKR-Texas-Instruments-datasheet-192328452.pdf?src-supplier=HQonline; ComponentLink6Description: https://datasheet.octopart.com:443/TPS22994RUKR-Texas-Instruments-datasheet-192328452.pdf?src-supplier=HQonline; ComponentLink7URL: https://datasheet.octopart.com:443/TPS22994RUKR-Texas-Instruments-datasheet-164420126.pdf?src-supplier=SHENGYU+ELECTRONICS; ComponentLink7Description: https://datasheet.octopart.com:443/TPS22994RUKR-Texas-Instruments-datasheet-164420126.pdf?src-supplier=SHENGYU+ELECTRONICS; ComponentLink8URL: https://datasheet.octopart.com:443/TPS22994RUKR-Texas-Instruments-datasheet-159598245.pdf?src-supplier=LCSC; ComponentLink8Description: https://datasheet.octopart.com:443/TPS22994RUKR-Texas-Instruments-datasheet-159598245.pdf?src-supplier=LCSC; ComponentLink9URL: http://sigma.octopart.com:80/reach_statement/Texas-Instruments-company-64.pdf?src-supplier=Compliance+Statements; ComponentLink9Description: http://sigma.octopart.com:80/reach_statement/Texas-Instruments-company-64.pdf?src-supplier=Compliance+Statements; ComponentLink10URL: http://sigma.octopart.com:80/conflict_mineral_statement/Texas-Instruments-company-63.pdf?src-supplier=Compliance+Statements; ComponentLink10Description: http://sigma.octopart.com:80/conflict_mineral_statement/Texas-Instruments-company-63.pdf?src-supplier=Compliance+Statements; Supplier 1: DigiKey; Supplier Part Number 1: 296-40724-1-ND; Supplier 2: DigiKey; Supplier Part Number 2: 296-40724-6-ND; Supplier 3: Mouser; Supplier Part Number 3: 595-TPS22994RUKR
pins: 1 VOUT2, 2 VIN2, 3 VBIAS, 4 VIN1, 5 VOUT1, 6 ADD1, 7 ON4, 8 ON3, 9 ON2, 10 ON1, 11 VOUT4, 12 VIN4, 13 GND, 14 VIN3, 15 VOUT3, 16 ADD2, 17 SCL, 18 VDD, 19 SDA, 20 ADD3

## TPS62162DSGR
designator PS?
3V-17V 1A Step-Down Converters with DCS-Controlâ„¢; MF: Texas Instruments; MP: TPS62162DSGR; SnapEDA_Link: https://www.snapeda.com/parts/TPS62162DSGR/Texas+Instruments/view-part/?ref=snap; Package: WSON-8 Texas Instruments; Value: *; Check_prices: https://www.snapeda.com/parts/TPS62162DSGR/Texas+Instruments/view-part/?ref=eda
footprint SON50P200X200X80-9N
pins: 1 PGND (power), 2 VIN (in), 3 EN (in), 4 AGND (power), 5 FB (in), 6 VOS (in), 7 SW (out), 8 PG (out), 9 EXP

## TPS63036YFGR
designator U?
High Efficient Single Inductor Buck-Boost Converter with 1-A Switches 8-DSBGA -40 to 85; Package: None; Price: None; Value: *; MP: TPS63036YFGR; Availability: Unavailable; Supplier 1: DigiKey; Supplier Part Number 1: 296-34935-1-ND; Supplier 2: DigiKey; Supplier Part Number 2: 296-34935-6-ND
footprint TPS63036YFGR (BGA, 8-Leads, Body 1,08x1,81mmx0,63mm, Pitch 0,40mm)
pins: A1 VIN, A2 EN, B1 L1, B2 PS/SYNC, C1 L2, C2 GND (power), D1 VOUT, D2 FB

## TPS562211DRLR
designator U?
Switching Regulator, Current-mode, 2A, 650kHz Switching Freq-Max, PDSO8; Manufacturer: Texas Instruments; Supplier: Mouser; Supplier Part Number: 595-TPS562211DRLR; Manufacturer Part Number: TPS562211DRLR; RoHS: No; Category: Voltage Regulators - Switching; Stock: 11447; Pricing: 1=0.38, 10=0.278, 50=0.268, 100=0.201, 1000=0.17, 10000=0.156 (USD); RoHS Compliant: Yes; Supplier 1: LCSC; Supplier Part Number 1: C3193226; Supplier 2: DigiKey; Supplier Part Number 2: 296-TPS562211DRLRCT-ND
footprint TPS562211
pins: 1 PG_SS, 2 VIN (power), 3 SW, 4 GND (power), 5 BST, 6 EN, 7 MODE, 8 FB

## TS3USB30ERSWR
designator U?
2 Channel USB Switch, 1:2 Mux / Demux, 10 ohm RON, 3.0 to 4.3V, -40 to 85 degC, 10-Pin UQFN (RSW), Green (RoHS & no Sb/Br); Manufacturer: Texas Instruments; Bandwidth(MHz): 900; RON Flatness(Max)(Ohms): 2; ESD HBM(kV): +/-8; ICC(uA): 1; ON Time(Max)(ns): 25; RON Mis-match(Max)(Ohms): 0.35; Architecture: "1","2 mux/demux"; tpd max(ns): 0.25; ron(max)(ohms): 10; OFF Time(Max)(ns): 30; Vcc range(V): 3.0 to 4.3; ComponentLink1URL: http://www.ti.com/general/docs/lit/getliterature.tsp?genericPartNumber=TS3USB30E&fileType=pdf; Eco-Plan: Green (RoHS & no Sb/Br); PackageDescription: 10-Lead Plastic Quad FlatPack, No-Lead 1.4x1.8x0.5mm Body, 0.4mm Pitch (R-PUQFN-N10); ComponentLink2Description: Package Specification; Code_JEDEC: MO-288-UDEE; ComponentLink1Description: Datasheet; SubFamily: USB Switch; Mounting Technology: Surface Mount; DatasheetVersion: SCDS255D; ComponentLink2URL: http://www.ti.com/lit/ml/mpqf206b/mpqf206b.pdf; PartNumber: TS3USB30ERSWR; PackageVersion: Jul-2008; IL OFF(Max)(nA): 2; PackageReference: RSW0010A; Number of Channels: 2; Supplier 1: Digikey; Supplier Part Number 1: 296-24684-1-ND; Supplier 2: Mouser; Supplier Part Number 2: 595-TS3USB30ERSWR
footprint RSW0010A_V (QFN, 10-Leads, Body 1.8x1.4mm, Pitch 0.4mm, TI Recommend)
pins: 1 D1+ (io) "Data ports", 2 D2+ (io) "Data ports", 3 D+ (io) "Data ports", 4 GND (power), 5 D- (io) "Data ports", 6 D2- (io) "Data ports", 7 D1- (io) "Data ports", 8 ~{OE} (in) "Bus-switch enable", 9 VCC (power) "Power Supply", 10 S (in) "Select input"

## TS110916045
designator SW?
Tactile Switch SPST 1.6N 4.5mm; Manufacturer 1: HanElectricity; Manufacturer Part Number 1: C22375350; Supplier 1: LCSC; Supplier Part Number 1: C22375350; Supplier Unit Price 1: 0.0056; Supplier Link 1: https://www.lcsc.com/product-detail/C22375350.html?spm=wm.fly.bg.5.xh&lcsc_vid=FlhaAlQAEVMNVwEHT1BfXwFWEwcLXgcEEldWBVUDFFcxVlNRQlBYUFNUR1VWUjsOAxUeFF5JWBYZEEoBGA4JCwFIFA4DSA%3D%3D
footprint TS110916045
pins: 1, 2, 3, 4

## TSM-105-01-T-DH-K-TR
designator J?
TSM Series .100 Surface Mount Terminal Strip; MF: Samtec; MP: TSM-105-01-T-DH-K-TR; Value: *; Price: None; SnapEDA_Link: https://www.snapeda.com/parts/TSM-105-01-T-DH-K-TR/Samtec/view-part/?ref=snap; Check_prices: https://www.snapeda.com/parts/TSM-105-01-T-DH-K-TR/Samtec/view-part/?ref=eda; Purchase-URL: https://pricing.snapeda.com/search/part/TSM-105-01-T-DH-K-TR/?ref=eda; Package: None; Availability: In Stock
footprint SAMTEC_TSM-105-01-T-DH-K-TR
pins: 1, 2, 3, 4, 5, 6, 7, 8, 9, 10

## TSM-106-02-L-SH-A
designator J?
Connector Header Surface Mount, Right Angle 6 position 0.100" (2.54mm); Manufacturer 1: SAMTEC; Datasheet Link: https://suddendocs.samtec.com/catalog_english/tsm.pdf; Manufacturer Part Number 1: TSM-106-02-L-SH-A; Supplier Part Number 1: 612-TSM-106-02-L-SH-A-P-TR-ND; Supplier Link 1: https://www.digikey.com.br/en/products/detail/samtec-inc/TSM-106-02-L-SH-A-P-TR/7633015; Supplier Unit Price 1: 1.89; Supplier 1: DigiKey
footprint TSM-106-02-L-SH-A-P-TR
pins: 1, 2, 3, 4, 5, 6

## UJ32CHGDSMT3P24TR
designator J?
Conn Rcpt Usb 3.2 Type C SMD Ra; Manufacturer: Same Sky; Manufacturer Part Number: UJ32-C-H-G-DSMT-3-P24-TR; Plating Thickness: 76.2nm; Supplier 1: DigiKey; Supplier Part Number 1: 2223-UJ32-C-H-G-DSMT-3-P24-TRCT-ND; Supplier 2: DigiKey; Supplier Part Number 2: 2223-UJ32-C-H-G-DSMT-3-P24-TRDKR-ND; Supplier 3: Mouser; Supplier Part Number 3: 179-UJ32CHGDST3P24TR; Supplier: DigiKey; Supplier Part Number: 2223-UJ32-C-H-G-DSMT-3-P24-TRCT-ND; RoHS: Compliant; Category: USB Connectors; Stock: 3229; Pricing: 1=0,83, 10=0,705, 25=0,6604, 50=0,629, 100=0,5989, 250=0,56136, 500=0,53454 (USD); Export Control Classification Number (ECCN) Code: EAR99; Harmonized Tariff Schedule (HTS) Code: 8536.69.40.30; Insulation Color: Black; Introduction Date: 2024-10-09; Lifecycle Status: Production; REACH SVHC: Yes; ComponentLink1URL: https://datasheet.octopart.com:443/UJ32-C-H-G-DSMT-3-P24-TR-Same-Sky-datasheet-188843587.pdf?src-supplier=Same+Sky; ComponentLink1Description: https://datasheet.octopart.com:443/UJ32-C-H-G-DSMT-3-P24-TR-Same-Sky-datasheet-188843587.pdf?src-supplier=Same+Sky; ComponentLink2URL: https://datasheet.octopart.com:443/UJ32-C-H-G-DSMT-3-P24-TR-Same-Sky-datasheet-181920856.pdf?src-supplier=Same+Sky; ComponentLink2Description: https://datasheet.octopart.com:443/UJ32-C-H-G-DSMT-3-P24-TR-Same-Sky-datasheet-181920856.pdf?src-supplier=Same+Sky; ComponentLink3URL: https://datasheet.octopart.com:443/UJ32-C-H-G-DSMT-3-P24-TR-Same-Sky-datasheet-192424260.pdf?src-supplier=Electro+Sonic; ComponentLink3Description: https://datasheet.octopart.com:443/UJ32-C-H-G-DSMT-3-P24-TR-Same-Sky-datasheet-192424260.pdf?src-supplier=Electro+Sonic; ComponentLink4URL: https://octopart.com:443/opatz8j6/c1?t=eF1L2Oibi-qJbUTPWeFo4kRbzeOnNxsoKZaN1ffGbhIgcK2_4WVQlE2iFdrSS8wdCLPMik7ClQ6M-rmFfQa3pLrA9bzH1Dri1N2vZ9Rft9AWxiEL8IduSHtJSDDPd2Ijpch4Xo-LAm8T7DzyMCgP1sJ9socctpmOqno5SMqWt1XVFQ-W9aX7ouIJYzJ7KAUlX2OAxGzbRUIFzLXgcN07GJjB4ucnapAQIIWyFeRxUkpwE6sI2ke5UTa3OVcFbW7Xac-IcmI6e5bIZZmQQyI0qO4v1lfO0LCq4DJFN2Fa0vJO44j9VRE1idTgDWj_Y6guygXHrkvxvz0lJ2A3pvjxugHnvTJNGAbIG44p7FR6DuLDdSYxka_l-8SU&src-supplier=Compliance+Statements; ComponentLink4Description: https://octopart.com:443/opatz8j6/c1?t=eF1L2Oibi-qJbUTPWeFo4kRbzeOnNxsoKZaN1ffGbhIgcK2_4WVQlE2iFdrSS8wdCLPMik7ClQ6M-rmFfQa3pLrA9bzH1Dri1N2vZ9Rft9AWxiEL8IduSHtJSDDPd2Ijpch4Xo-LAm8T7DzyMCgP1sJ9socctpmOqno5SMqWt1XVFQ-W9aX7ouIJYzJ7KAUlX2OAxGzbRUIFzLXgcN07GJjB4ucnapAQIIWyFeRxUkpwE6sI2ke5UTa3OVcFbW7Xac-IcmI6e5bIZZmQQyI0qO4v1lfO0LCq4DJFN2Fa0vJO44j9VRE1idTgDWj_Y6guygXHrkvxvz0lJ2A3pvjxugHnvTJNGAbIG44p7FR6DuLDdSYxka_l-8SU&src-supplier=Compliance+Statements; ComponentLink5URL: https://octopart.com:443/opatz8j6/c1?t=PRhnwL-leXPv6J1zwteh3GYdldbMrT5Z6dpDheuaFmGqSw6PZK8MG0F6BVSnn2sm1mGqro0xJydw5HfexrpZSokg45eonqhkXLCYChuZcsXQmHLLBd4VBe1Z-qfvvouNLjKCNkMnk9DhA9_QBRi6Yp_o5aGnwzCXNIqE07igYjLnnXSPcehHJcZFza1o7RgYMUU_RbDTV2D3OILrca6Ln_M_O15qVmCjxZCbNT_HXTMRweeCveZMS4IlUmlnivM-kQTtTMAtg4xnTPXg5uYjoGK8_17eUsauSK5O6zxq1Bizl1KxicSI658vsdpfPu2MyprtnWqO70Aenk2aNkXwKyT9NMGcR6BEELwmazgD7x5U4Zw9J-PgtRUd&src-supplier=Compliance+Statements; ComponentLink5Description: https://octopart.com:443/opatz8j6/c1?t=PRhnwL-leXPv6J1zwteh3GYdldbMrT5Z6dpDheuaFmGqSw6PZK8MG0F6BVSnn2sm1mGqro0xJydw5HfexrpZSokg45eonqhkXLCYChuZcsXQmHLLBd4VBe1Z-qfvvouNLjKCNkMnk9DhA9_QBRi6Yp_o5aGnwzCXNIqE07igYjLnnXSPcehHJcZFza1o7RgYMUU_RbDTV2D3OILrca6Ln_M_O15qVmCjxZCbNT_HXTMRweeCveZMS4IlUmlnivM-kQTtTMAtg4xnTPXg5uYjoGK8_17eUsauSK5O6zxq1Bizl1KxicSI658vsdpfPu2MyprtnWqO70Aenk2aNkXwKyT9NMGcR6BEELwmazgD7x5U4Zw9J-PgtRUd&src-supplier=Compliance+Statements
footprint UJ32CHGDSMT3P24TR
pins: A1 GND, A2 TX1_P, A3 TX1_N, A4 VBUS, A5 CC1, A6 D_P, A7 D_N, A8 SBU1, A9 VBUS, A10 RX2_N, A11 RX2_P, A12 GND, B1 GND, B2 TX2_P, B3 TX2_N, B4 VBUS, B5 CC2, B6 D_P, B7 D_N, B8 SBU2, B9 VBUS, B10 RX1_N, B11 RX1_P, B12 GND, SH1 SHIELD, SH2 SHIELD, SH3 SHIELD, SH4 SHIELD

## USB4110-GF-A
designator J?  (value not drawn)
USB Connectors USB Type C, 2.0, Rec, SMT , G/F, RA , Top Mnt, T & R; Manufacturer_Name: GCT (GLOBAL CONNECTOR TECHNOLOGY); Mouser Part Number: 640-USB4110-GF-A; Source: SamacSys.SchLib; Datasheet Link: https://gct.co/files/drawings/usb4110.pdf; Manufacturer_Part_Number: USB4110-GF-A; Mouser Price/Stock: https://www.mouser.co.uk/ProductDetail/GCT/USB4110-GF-A?qs=KUoIvG%2F9IlYiZvIXQjyJeA%3D%3D; Height: 3.26mm; Design Item ID: USB4110-GF-A; Component Type: Connectors
footprint USB4110GFA
pins: A1 GND, A4 VBUS, A5 CC1, A6 DP1, A7 DN1, A8 SBU1, A9 VBUS, A12 GND, B1 GND, B4 VBUS, B5 CC2, B6 DP2, B7 DN2, B8 SBU2, B9 VBUS, B12 GND, MP1, MP2, MP3, MP4

## USB-C Conn
designator J?, comment 12402012E212A
USB Connector, USB Type C, USB 2.0, Receptacle, 24 Ways, Surface Mount, Through Hole Mount; Manufacturer: Amphenol; Contact Resistance: 40mΩ; Current Rating: 5A; Insulation Resistance: 100MΩ; Number of Ports: 1; Supplier: DigiKey; Supplier Part Number: 664-12402012E212ACT-ND; Manufacturer Part Number: 12402012E212A; RoHS: Compliant; Category: Connectors; Stock: 15000; Pricing: 1=0.61, 10=0.517, 25=0.4848, 50=0.4616, 100=0.4396, 250=0.41204 (USD); Contact Gender: Male; Lifecycle Status: Production; Pins: 24; Number of Rows: 1; REACH SVHC: Yes; Shell Finish: Nickel; Shell Material: Stainless Steel; Terminal Pitch: 500µm; ComponentLink1URL: https://datasheet.octopart.com:443/12402012E212A-Amphenol-Communications-Solutions-datasheet-182242347.pdf?src-supplier=IHS; ComponentLink1Description: https://datasheet.octopart.com:443/12402012E212A-Amphenol-Communications-Solutions-datasheet-182242347.pdf?src-supplier=IHS; Supplier 1: DigiKey; Supplier Part Number 1: 664-12402012E212ACT-ND; Supplier 2: DigiKey; Supplier Part Number 2: 664-12402012E212ATR-ND; Supplier 3: Mouser; Supplier Part Number 3: 523-12402012E212A
footprint AMPHENOL_12402012E212A
pins: A1_B12 GND, A4_B9 VBUS, A5 CC1, A6 DP1, A7 DN1, A8 SBU1, B1_A12 GND, B4_A9 VBUS, B5 CC2, B6 DP2, B7 DN2, B8 SBU2, SH1 SHIELD, SH2 SHIELD, SH3 SHIELD, SH4 SHIELD

## USBLC6-2SC6
designator U?
TVS Diode Array Uni-Directional USBLC6-2SC6 17V; Manufacturer 1: STMicroelectronics; Datasheet: https://www.st.com/resource/en/datasheet/usblc6-2.pdf; Height: 1.45mm; Manufacturer Part Number 1: USBLC6-2SC6; Supplier Part Number 1: 511-USBLC6-2SC6; Supplier Link 1: https://br.mouser.com/ProductDetail/STMicroelectronics/USBLC6-2SC6?qs=po45yt2pPpu%2FhNIlwQdTlg%3D%3D&srsltid=AfmBOoqislOEDh1UBDOoi8KtJgWNZBCyfvAKcoWTZlt-wyjpMBhjDG33; Supplier 1: Mouser; Supplier Unit Price 1: 0.36
footprint SOT95P280X145-6N
pins: 1 I/O1_1, 2 GND, 3 I/O2_1, 4 I/O2_2, 5 VBUS, 6 I/O1_2
text: IO1; IO2

## VCNL4040M3OE
designator U?
SENSOR OPT 550NM AMBIENT 8SMD; Manufacturer: Vishay; Sensor Output: I2C; Max Supply Voltage: 3.6V; Min Supply Voltage: 2.5V; Operating Supply Current: 0.2-300uA; ComponentLink2Description: Datasheet; Temperature: -40°C to +85°C; Device Class L2: Optical Sensors; Digikey Description: SENSOR OPT 550NM AMBIENT 8SMD; Package: 0; ComponentLink2URL: https://www.vishay.com/docs/84274/vcnl4040.pdf; Device Class L3: unset; Temperature Range High: +85°C; Height: 1.15mm; Ambient Temperature Range High: +85°C; Lead Free: Yes; Ambient Temperature Range Low: -40°C; Automotive: No; RoHS: TRUE; Category: IC; Device Class L1: Sensors; Temperature Range Low: -40°C; Octopart: https://octopart.com/vcnl4040m3oe-vishay-56243155; Manufacturer Part Number: VCNL4040M3OE; Supplier 1: Digikey; Supplier Part Number 1: VCNL4040M3OEDKR-ND; Supplier 2: Mouser; Supplier Part Number 2: 78-VCNL4040M3OE
footprint VCNL4040M3OE-MFG (Ambient Light Sensor and Proximity Sensor.)
pins: 1 GND, 2 CATHODE(sensor), 3 VDD, 4 A, 5 CATHODE(LED), 6 INT, 7 SDAT, 8 SCLK

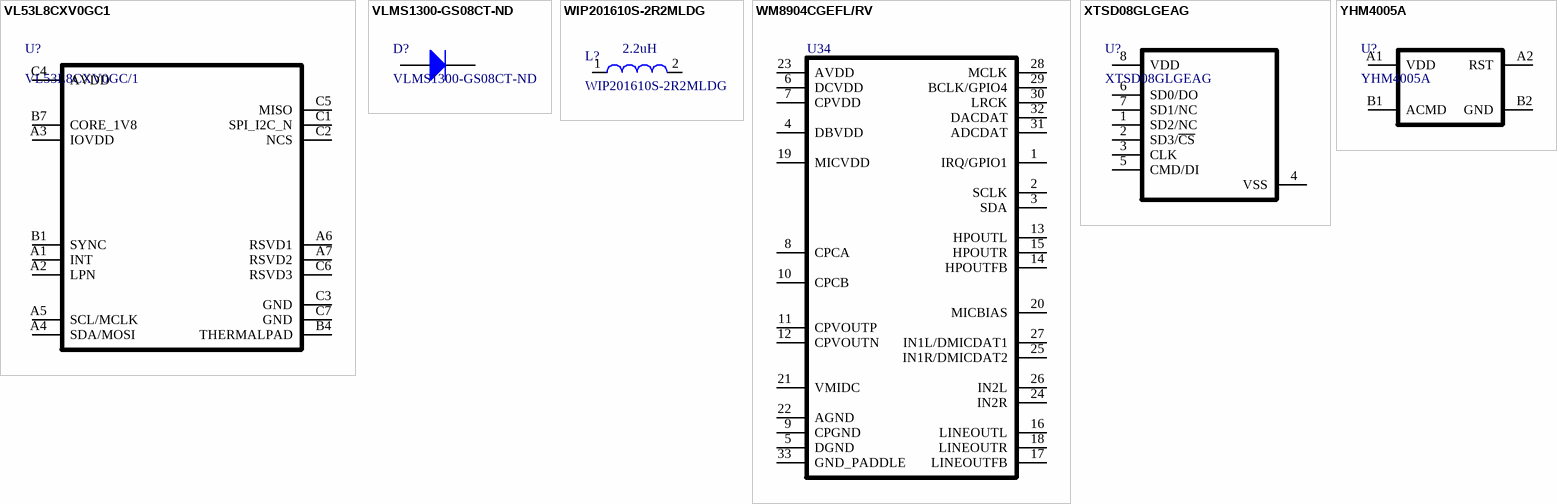
[diagram p17: symbols VL53L8CXV0GC1 to YHM4005A]

## VL53L8CXV0GC1
designator U?, comment VL53L8CXV0GC/1
Low-power high-performance 8x8 multizone Time-of-Flight sensor (ToF); Manufacturer_Name: STMicroelectronics; Copyright: Copyright (C) 2025 Ultra Librarian. All rights reserved.; Manufacturer_Part_Number: VL53L8CXV0GC/1; Datasheet: https://www.st.com/resource/en/datasheet/vl53l8cx.pdf; RefDes: RefDes; Type: Type; Supplier 1: Digikey; Supplier Part Number 1: 497-VL53L8CXV0GC/1-ND; Supplier 2: Mouser; Supplier Part Number 2: 511-VL53L8CXV0GC/1
footprint IC17_LGA16_STM
pins: A1 INT, A2 LPN, A3 IOVDD, A4 SDA/MOSI, A5 SCL/MCLK, A6 RSVD1, A7 RSVD2, B1 SYNC, B4 THERMALPAD, B7 CORE_1V8, C1 SPI_I2C_N, C2 NCS, C3 GND, C4 AVDD, C5 MISO, C6 RSVD3, C7 GND

## VLMS1300-GS08CT-ND
designator D?
Single Color LED, Super Red, 1.1mm; Manufacturer: Vishay Semiconductors; Shape: Rectangular; Forward Current: 30mA; Channels: 1; Viewing Angle: 130°; Luminous Intensity-Nom: 54mcd; Forward Voltage: 2.4V; Reverse Voltage-Max: 5V; Additional Feature: HIGH RELIABILITY; Overall Height: 0.8mm; Supplier: Digikey; Supplier Part Number: VLMS1300-GS08CT-ND; Manufacturer Part Number: VLMS1300-GS08; RoHS: Yes; Category: LEDs; Stock: 43066; Pricing: 1=0.21, 10=0.143, 100=0.0998, 500=0.07982, 1000=0.07322 (USD); Mounting Technology: Surface Mount; Pins: 2; Color: Red; Color@wavelength: Red; Min Operating Temperature: -35°C; Max Operating Temperature: 85°C; Optoelectronic Device Type: SINGLE COLOR LED; Packaging: Tape and Reel; Size: 1.1mm; Terminal Pitch: 1.5mm; Reach SVHC Compliant: Yes; RoHS Compliant: Yes; ComponentLink1URL: https://datasheet.ciiva.com:443/pdfs/VipMasterIC/IC/VISH/VISH-S-A0004564149/VISH-S-A0004564149-1.pdf?src-supplier=IHS+Markit; ComponentLink1Description: https://datasheet.ciiva.com:443/pdfs/VipMasterIC/IC/VISH/VISH-S-A0004564149/VISH-S-A0004564149-1.pdf?src-supplier=IHS+Markit
footprint VLMS1300-GS08CT-ND (Red Led 0603)
pins: 1 A, 2 K

## WIP201610S-2R2MLDG
designator L?  value 2.2uH
2.2 µH Shielded Wirewound Inductor 2 A 140mOhm Max 0806 (2016 Metric); Manufacturer: INPAQ Technologies; Supplier: DigiKey; Supplier Part Number: 3526-WIP201610S-2R2MLDGCT-ND; Manufacturer Part Number: WIP201610S-2R2MLDG; Supplier Unit Price: 0.1; Supplier Link: https://www.digikey.com/en/products/detail/inpaq-technology-co-ltd/WIP201610S-2R2MLDG/20486614; Datasheet: https://mm.digikey.com/Volume0/opasdata/d220001/medias/docus/5561/WIP201610S%20L%20Series.pdf
footprint WIP201610S-2R2ML (Chip Inductor, 2-Leads, Body 2.00x1.60mm, IPC Medium Density)
pins: 1, 2

## WM8904CGEFL/RV
designator U34  (value not drawn)
WOLFSON MICROELECTRONICS WM8904CGEFL/RV Audio Codec, Stereo, 2, 2, -40 C, 85 C, 96 kSPS; Manufacturer: Cirrus Logic; Interface: 2-Wire, Serial; Number of A/D Converters: 2; Number of Circuits: 1; Operating Supply Voltage: 1V; Resolution: 3B; Sampling Rate: 96ksps; Signal to Noise Ratio (SNR): 91dB; ComponentLink1URL: http://tunmcdsvn.tun.st.com/Component_Documentation_Library/Trunk/IC/CIRRUS_LOGIC_WM8904CGEFL-RV; Supplier: DigiKey; Supplier Part Number: 598-2437-1-ND; Manufacturer Part Number: WM8904CGEFL/RV; RoHS: Compliant; Category: CODECs; Stock: 8660; Pricing: 1=6.01, 10=4.606, 25=4.2556, 100=3.8706, 250=3.68704, 500=3.5764, 1000=3.48534 (USD); Case/Package: QFN; Height - Seated (Max): 800µm; Lead Free: Lead Free; Length: 4mm; Lifecycle Status: Production; Max Operating Temperature: 85°C; Min Operating Temperature: -40°C; Mounting Technology: Surface Mount; Number of Channels: 2; Number of D/A Converters: 2; Pins: 32; Number of Terminals: 32; Packaging: Cut Tape; REACH SVHC: Yes; Terminal Pitch: 400µm; Weight: 188.609377mg; Width: 4mm; ComponentLink2URL: https://datasheet.octopart.com:443/WM8904CGEFL-RV-Cirrus-Logic-datasheet-180105657.pdf?src-supplier=IHS; ComponentLink2Description: https://datasheet.octopart.com:443/WM8904CGEFL-RV-Cirrus-Logic-datasheet-180105657.pdf?src-supplier=IHS; ComponentLink3URL: https://datasheet.octopart.com:443/WM8904CGEFL-RV-Cirrus-Logic-datasheet-134530298.pdf?src-supplier=Augswan; ComponentLink3Description: https://datasheet.octopart.com:443/WM8904CGEFL-RV-Cirrus-Logic-datasheet-134530298.pdf?src-supplier=Augswan; Supplier 1: DigiKey; Supplier Part Number 1: 598-2437-1-ND; Supplier 2: DigiKey; Supplier Part Number 2: 598-2437-2-ND; Supplier 3: Mouser; Supplier Part Number 3: 238-WM8904CGEFL/RV
footprint QFN40P400X400X80_HS-33N (QFN, 32-Leads, Body 4.00x4.00mm, Pitch 0.40mm, Thermal Pad 2.70x2.70mm, IPC Medium Density)
pins: 1 IRQ/GPIO1, 2 SCLK, 3 SDA, 4 DBVDD, 5 DGND, 6 DCVDD, 7 CPVDD, 8 CPCA, 9 CPGND, 10 CPCB, 11 CPVOUTP, 12 CPVOUTN, 13 HPOUTL, 14 HPOUTFB, 15 HPOUTR, 16 LINEOUTL, 17 LINEOUTFB, 18 LINEOUTR, 19 MICVDD, 20 MICBIAS, 21 VMIDC, 22 AGND, 23 AVDD, 24 IN2R, 25 IN1R/DMICDAT2, 26 IN2L, 27 IN1L/DMICDAT1, 28 MCLK, 29 BCLK/GPIO4, 30 LRCK, 31 ADCDAT, 32 DACDAT, 33 GND_PADDLE